# Altium footprint library LED-Optocupler$.PcbLib: 72 footprints (part 4 of 5)
Each footprint in its own frame and in the unit in brackets; x right, y up, seen from the top. Pads: shape width x height; smd on the part's side, far side on the other; paste and mask are expansions set on the pad; w line width, h text height; cw(c..) or ccw(c..) is an arc to the next point about the centre after c.
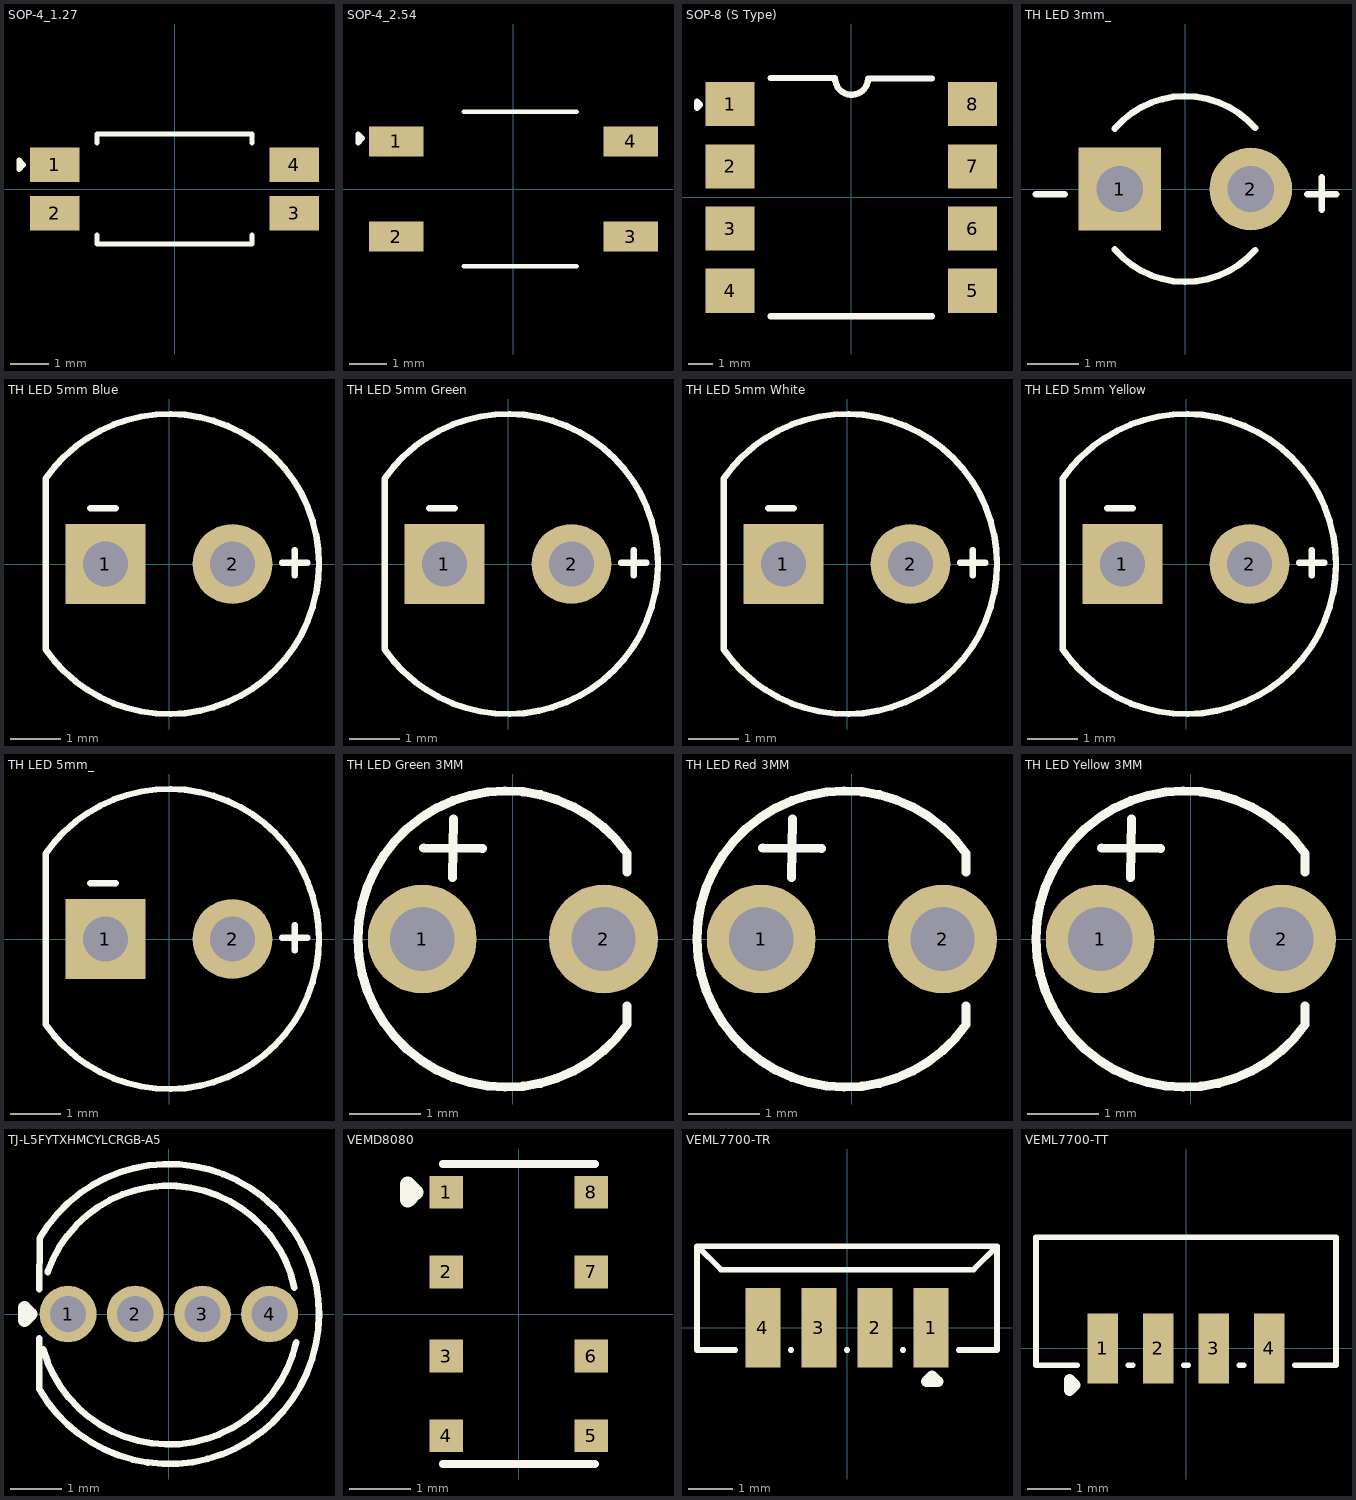
[diagram p3: the footprints below, top view; thin cyan lines are the x and y axes]

## SOP-4_1.27 [mm]
pads (4):
  rect 1.3x0.9 smd: 1(-3.15,0.635) 2(-3.15,-0.635) 3(3.15,-0.635) 4(3.15,0.635)
Top Overlay:
  lines w0.127: -2.038,-1.214 -2.038,-1.448 2.001,-1.448 ; -2.038,1.214 -2.038,1.448 2.001,1.448 ; 2.038,-1.448 2.038,-1.214 ; 2.038,1.214 2.038,1.448 ; -4.089,0.508 -4.089,0.762 -3.962,0.635 -4.089,0.508
3D body "User Library-SOP-4-1.step": height 2.1, standoff 0, extent -3.5,-1.4 3.5,1.4

## SOP-4_2.54 [mm]
pads (4):
  rect 1.45x0.8 smd: 1(-3.125,1.27) 2(-3.125,-1.27) 3(3.125,-1.27) 4(3.125,1.27)
Top Overlay:
  lines w0.127: -1.321,-2.057 1.676,-2.057 ; -1.321,2.057 1.676,2.057 ; -4.14,1.219 -4.14,1.473 -4.013,1.346 -4.14,1.219
3D body "User Library-SOP-4.step": height 2.02, standoff -0.02, extent -3.43,-2 3.43,2

## SOP-8 (S Type) [mm]
pads (8):
  rect 2x1.8 smd paste+0 mask+0.051: 1(-4.95,3.81) 2(-4.95,1.27) 3(-4.95,-1.27) 4(-4.95,-3.81) 5(4.95,-3.81) 6(4.95,-1.27) 7(4.95,1.27) 8(4.95,3.81)
Top Overlay:
  lines w0.254: -3.3,-4.85 3.3,-4.85 ; -3.3,4.877 -0.66,4.877 ccw(c0.013,4.863) 0.686,4.85 3.3,4.85 ; -6.298,3.658 -6.298,3.912 -6.171,3.785 -6.298,3.658
3D body "4561.step": height 5.08, standoff 0, extent -5.15,-4.85 5.15,4.85

## TH LED 3mm_ [mm]
pads (2):
  rect 1.6x1.6 hole 0.9: 1(-1.27,0)
  round 1.6 hole 0.9: 2(1.27,0)
Top Overlay:
  lines w0.127: -2.896,-0.102 -2.337,-0.102 ; -1.37,-1.167 ccw(c0,0) 1.353,-1.187 ; -1.37,1.167 cw(c0,0) 1.353,1.187 ; 2.362,-0.102 2.921,-0.102 ; 2.642,-0.406 2.642,0.229
3D body "User Library-LED 3 mm.step": height 6.25, standoff -10.8, extent -1.5,-1.998 2,1.998

## TH LED 5mm Blue [mm]
pads (2):
  rect 1.6x1.6 hole 0.9: 1(-1.27,0)
  round 1.6 hole 0.9: 2(1.27,0)
Top Overlay:
  lines w0.127: -1.575,1.118 -1.067,1.118 ; 2.261,0.025 2.769,0.025 ; 2.515,-0.229 2.515,0.279 ; -2.466,-1.709 ccw(c0,0) 3,0 ccw(c0,0) -2.466,1.709 -2.466,-1.709
3D body "User Library-LED-D5R.step": height 9.44, standoff -6, extent -2.5,-3 3,3

## TH LED 5mm Green [mm]
pads (2):
  rect 1.6x1.6 hole 0.9: 1(-1.27,0)
  round 1.6 hole 0.9: 2(1.27,0)
Top Overlay:
  lines w0.127: -1.575,1.118 -1.067,1.118 ; 2.261,0.025 2.769,0.025 ; 2.515,-0.229 2.515,0.279 ; -2.466,-1.709 ccw(c0,0) 3,0 ccw(c0,0) -2.466,1.709 -2.466,-1.709
3D body "User Library-LED-D5R.step": height 9.44, standoff -6, extent -2.5,-3 3,3

## TH LED 5mm White [mm]
pads (2):
  rect 1.6x1.6 hole 0.9: 1(-1.27,0)
  round 1.6 hole 0.9: 2(1.27,0)
Top Overlay:
  lines w0.127: -1.575,1.118 -1.067,1.118 ; 2.261,0.025 2.769,0.025 ; 2.515,-0.229 2.515,0.279 ; -2.466,-1.709 ccw(c0,0) 3,0 ccw(c0,0) -2.466,1.709 -2.466,-1.709
3D body "User Library-LED-D5R.step": height 9.44, standoff -6, extent -2.5,-3 3,3

## TH LED 5mm Yellow [mm]
pads (2):
  rect 1.6x1.6 hole 0.9: 1(-1.27,0)
  round 1.6 hole 0.9: 2(1.27,0)
Top Overlay:
  lines w0.127: -1.575,1.118 -1.067,1.118 ; 2.261,0.025 2.769,0.025 ; 2.515,-0.229 2.515,0.279 ; -2.466,-1.709 ccw(c0,0) 3,0 ccw(c0,0) -2.466,1.709 -2.466,-1.709
3D body "User Library-LED-D5R.step": height 9.44, standoff -6, extent -2.5,-3 3,3

## TH LED 5mm_ [mm]
pads (2):
  rect 1.6x1.6 hole 0.9: 1(-1.27,0)
  round 1.6 hole 0.9: 2(1.27,0)
Top Overlay:
  lines w0.127: -1.575,1.118 -1.067,1.118 ; 2.261,0.025 2.769,0.025 ; 2.515,-0.229 2.515,0.279 ; -2.466,-1.709 ccw(c0,0) 3,0 ccw(c0,0) -2.466,1.709 -2.466,-1.709
3D body "User Library-LED-D5R.step": height 9.44, standoff -6, extent -2.5,-3 3,3

## TH LED Green 3MM [mil]
pads (2):
  round 60 hole 35.43 paste+0 mask+2: 1(-50,0) 2(50,0)
Top Overlay:
  lines w5: -49.15,50.19 -16.85,49.81 ; -33.19,33.85 -32.81,66.15 ; 62.99,-36.87 62.99,-47.24 cw(c-3.68,0) 62.99,47.24 62.99,36.87
3D body "204-10SYGD_S530-E3.step": height 204.73, standoff -137.79, extent -79.06,-79.92 61.1,77.56

## TH LED Red 3MM [mil]
pads (2):
  round 60 hole 35.43 paste+0 mask+2: 1(-50,0) 2(50,0)
Top Overlay:
  lines w5: -49.15,50.19 -16.85,49.81 ; -33.19,33.85 -32.81,66.15 ; 62.99,-36.87 62.99,-47.24 cw(c-3.68,0) 62.99,47.24 62.99,36.87
3D body "204-10SYGD_S530-E3.step": height 204.73, standoff -137.79, extent -79.06,-79.92 61.1,77.56

## TH LED Yellow 3MM [mil]
pads (2):
  round 60 hole 35.43 paste+0 mask+2: 1(-50,0) 2(50,0)
Top Overlay:
  lines w5: -49.15,50.19 -16.85,49.81 ; -33.19,33.85 -32.81,66.15 ; 62.99,-36.87 62.99,-47.24 cw(c-3.68,0) 62.99,47.24 62.99,36.87
3D body "204-10SYGD_S530-E3.step": height 204.73, standoff -137.79, extent -79.06,-79.92 61.1,77.56

## TJ-L5FYTXHMCYLCRGB-A5 [mm]
pads (4):
  round 1.1 hole 0.7 paste+0 mask+0.051: 1(-1.95,0) 2(-0.65,0) 3(0.65,0) 4(1.95,0)
Top Overlay:
  lines w0.127: -2.507,-0.472 -2.511,-1.45 ccw(c0.003,0.001) -2.5,1.471 -2.504,0.476 ; -2.43,-0.68 ccw(c0,0) 2.464,-0.543 ; -2.347,0.811 cw(c0,0) 2.43,0.51
  lines w0.254: -2.794,-0.127 -2.667,0 -2.794,0.127 -2.794,-0.127
3D body "TJ-L5FYTXHMCYLCRGB-A5.step": height 8.7, standoff -3.5, extent -2.51,-2.9 2.9,2.9

## VEMD8080 [mm]
pads (8):
  rect 0.55x0.54 smd: 1(-1.19,2) 2(-1.19,0.69) 3(-1.19,-0.69) 4(-1.19,-2) 5(1.19,-2) 6(1.19,-0.69) 7(1.19,0.69) 8(1.19,2)
Top Overlay:
  lines w0.127: -1.25,-2.463 1.25,-2.463 ; -1.25,2.463 1.25,2.463
  lines w0.254: -1.825,1.873 -1.825,2.127 -1.698,2 -1.825,1.873
3D body "VEMD8080.step": height 0.53, standoff 0, extent -1.25,-2.4 1.25,2.4

## VEML7700-TR [mm]
pads (4):
  rect 0.8x1.8 smd paste+0 mask+0.05: 1(1.905,0) 2(0.635,0) 3(-0.635,0) 4(-1.905,0)
Top Overlay:
  lines w0.127: -2.536,-0.5 -3.4,-0.5 -3.4,1.85 ; -1.274,-0.5 -1.266,-0.5 ; -0.004,-0.5 0.004,-0.5 ; 1.266,-0.5 1.274,-0.5 ; 2.536,-0.5 3.4,-0.5 3.4,1.85 ; -3.4,1.85 3.4,1.85 ; -3.4,1.85 -3.39,1.85 -2.86,1.32 2.87,1.32 3.4,1.85
  lines w0.25: 1.803,-1.219 1.93,-1.092 2.057,-1.219 1.803,-1.219
3D body "C504893.step": height 3, standoff 0, extent -3.4,-0.506 3.4,1.844

## VEML7700-TT [mm]
pads (4):
  rect 0.7x1.6 smd paste+0 mask+0.05: 1(-1.905,0) 2(-0.635,0) 3(0.635,0) 4(1.905,0)
Top Overlay:
  lines w0.127: -2.486,-0.381 -3.429,-0.381 -3.429,2.538 3.429,2.538 3.429,-0.381 2.486,-0.381 ; -1.324,-0.381 -1.216,-0.381 ; -0.054,-0.381 0.054,-0.381 ; 1.216,-0.381 1.324,-0.381
  lines w0.25: -2.667,-0.965 -2.667,-0.711 -2.54,-0.838 -2.667,-0.965
3D body "C1850416.step": height 2.35, standoff 0, extent -3.4,-0.457 3.4,2.543